# Altium footprint library Footprint.PcbLib: 154 footprints (part 6 of 10)
Each footprint in its own frame and in the unit in brackets; x right, y up, seen from the top. Pads: shape width x height; smd on the part's side, far side on the other; paste and mask are expansions set on the pad; w line width, h text height; cw(c..) or ccw(c..) is an arc to the next point about the centre after c.
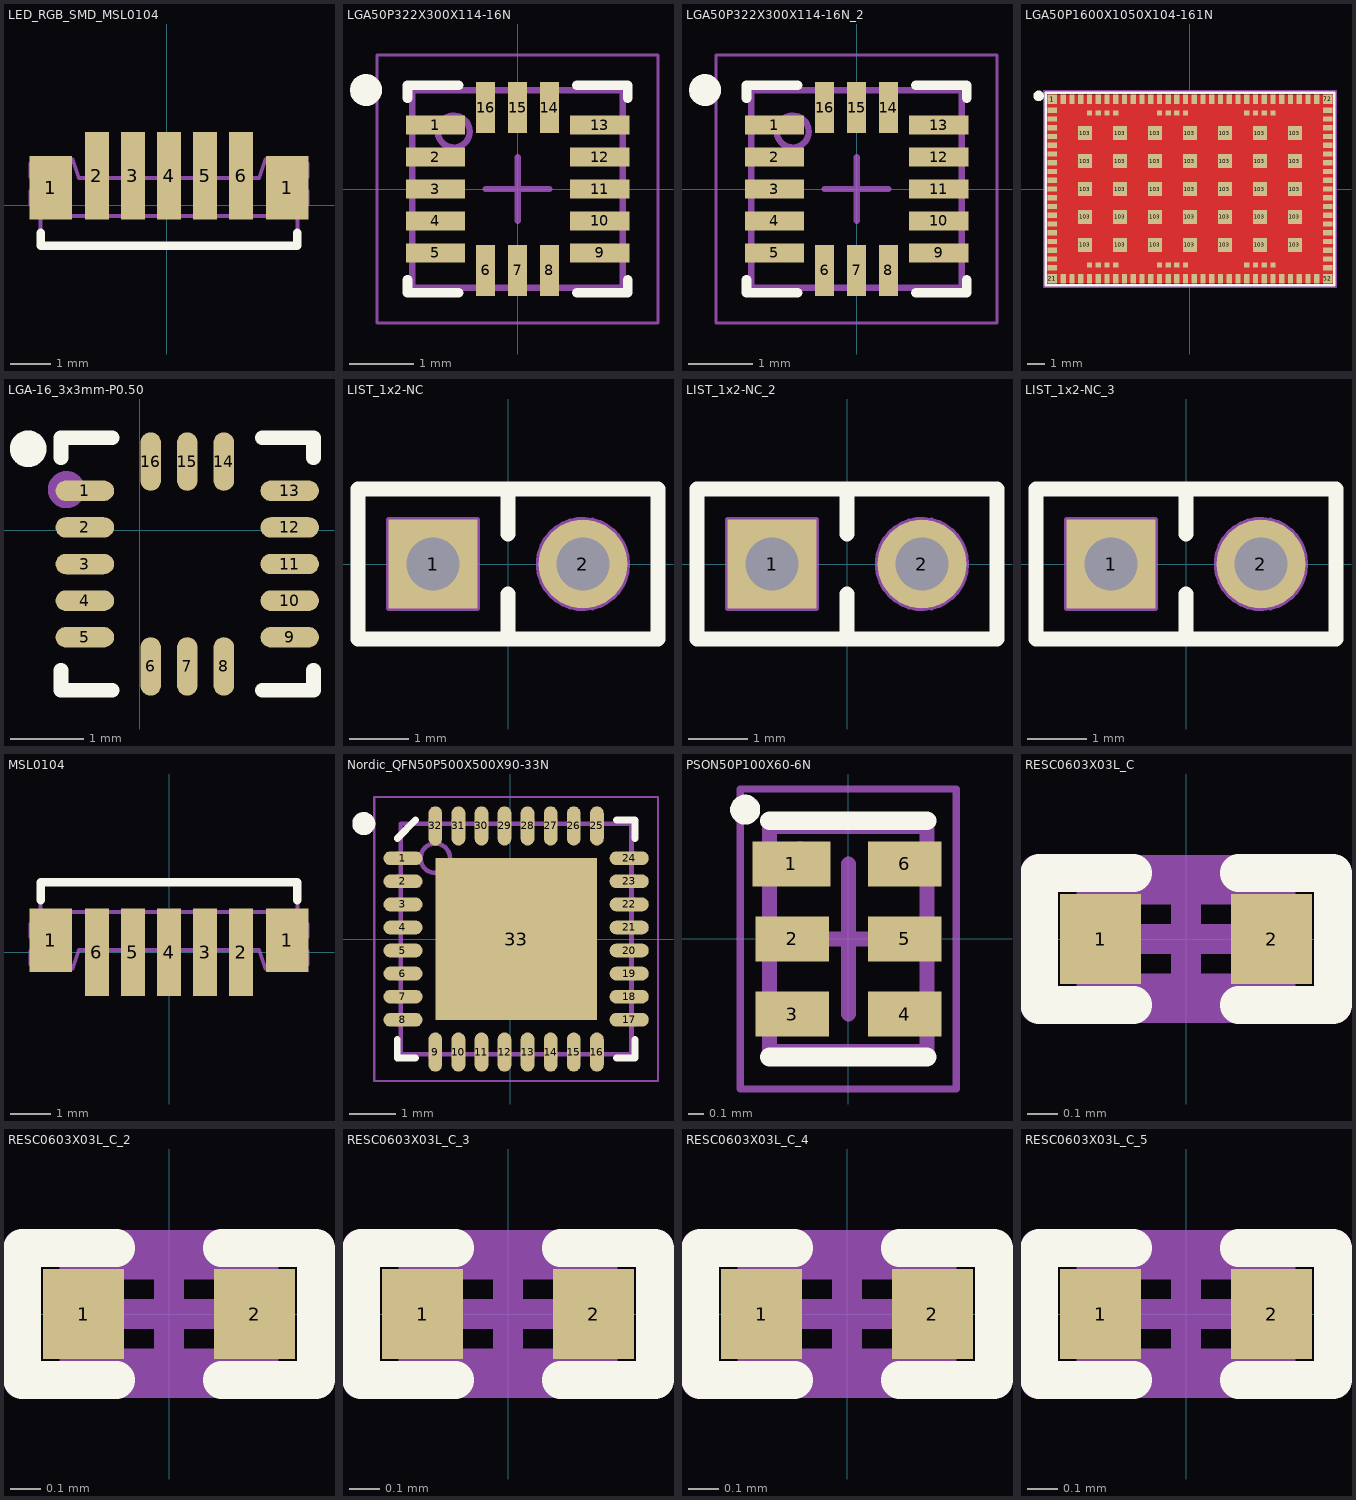
[diagram p5: the footprints below, top view; thin cyan lines are the x and y axes]

## LED_RGB_SMD_MSL0104 [mm]
pads (7):
  rect 1.06x1.58 smd paste+0: 1(-2.899,0.437) 1(3.001,0.437)
  rect 0.6x2.18 smd paste+0: 2(-1.749,0.737) 3(-0.849,0.737) 4(0.051,0.737) 5(0.951,0.737) 6(1.851,0.737)
Top Overlay:
  lines w0.21: -3.149,-0.686 -3.149,-1.013 3.251,-1.013 3.251,-0.686
Mechanical 7:
  lines w0.1: -3.399,0.362 -3.399,0.037 -3.047,0.037 ; -3.399,0.712 -3.399,1.037 -2.958,1.037 ; -3.398,0.362 ccw(c-3.398,0.537) -3.398,0.712 ; -3.074,-0.263 -2.949,1.137 -2.349,1.137 -2.199,0.687 2.301,0.687 2.451,1.137 3.051,1.137 3.176,-0.263 ; -1.999,0.687 -1.999,1.037 -1.499,1.037 -1.499,0.687 ; -1.099,0.687 -1.099,1.037 -0.599,1.037 -0.599,0.687 ; -0.929,-0.263 -0.929,0.687 ; -0.199,0.687 -0.199,1.037 0.301,1.037 0.301,0.687 ; 0.701,0.687 0.701,1.037 1.201,1.037 1.201,0.687 ; 1.031,-0.263 1.031,0.687 ; 1.601,0.687 1.601,1.037 2.101,1.037 2.101,0.687 ; 3.06,1.037 3.501,1.037 3.501,0.712 ; 3.149,0.037 3.501,0.037 3.501,0.362 cw(c3.501,0.537) 3.501,0.712 ; 3.501,0.712 3.502,0.712 ; -3.149,-1.013 -3.149,-0.263 3.251,-0.263 3.251,-1.013 -3.149,-1.013
3D body: height 0.1, standoff 0, extent 1.601,-0.338 2.101,1.037
3D body: height 1.92, standoff 0.33, extent -2.649,-1.038 2.751,-0.988
3D body: height 0.1, standoff 0, extent 0.701,-0.338 1.201,1.037
3D body: height 0.1, standoff 0, extent -0.199,-0.338 0.301,1.037
3D body: height 0.1, standoff 0, extent -1.099,-0.338 -0.599,1.037
3D body: height 0.1, standoff 0, extent -1.999,-0.338 -1.499,1.037
3D body: height 0.1, standoff 0, extent -3.399,-0.338 -2.399,1.037
3D body: height 0.1, standoff 0, extent 2.501,-0.338 3.501,1.037
3D body: height 2.15, standoff 0.1, extent -3.149,-1.013 3.251,-0.263
3D body: height 2.15, standoff 0.1, extent -3.074,-0.263 3.176,1.137

## LGA50P322X300X114-16N [mm]
pads (16):
  rect 0.925x0.3 smd mask+0.06: 1(-1.288,1) 2(-1.288,0.5) 3(-1.288,0) 4(-1.288,-0.5) 5(-1.288,-1) 9(1.288,-1) 10(1.288,-0.5) 11(1.288,0) 12(1.288,0.5) 13(1.288,1)
  rect 0.3x0.8 smd mask+0.06: 6(-0.5,-1.275) 7(0,-1.275) 8(0.5,-1.275) 14(0.5,1.275) 15(0,1.275) 16(-0.5,1.275)
Top Overlay:
  circle w0.25: c-2.375,1.55 r0.125
  lines w0.15: -1.725,-1.425 -1.725,-1.625 -0.925,-1.625 ; -1.725,1.425 -1.725,1.625 -0.925,1.625 ; 0.925,-1.625 1.725,-1.625 1.725,-1.425 ; 0.925,1.625 1.725,1.625 1.725,1.425
Mechanical 7:
  circle w0.1: c-1,0.9 r0.25
  lines w0.1: -1.65,-1.55 1.65,-1.55 1.65,1.55 -1.65,1.55 -1.65,-1.55
Mechanical 15:
  lines w0.05: -2.2,-2.1 2.2,-2.1 2.2,2.1 -2.2,2.1 -2.2,-2.1
  lines w0.1: -0.5,0 0.5,0 ; 0,-0.5 0,0.5
3D body "LGA50P322X300X114-16N.step": height 1.14, standoff 0, extent -1.65,-1.55 1.65,1.55

## LGA50P322X300X114-16N_2 [mm]
pads (16):
  rect 0.925x0.3 smd mask+0.06: 1(-1.288,1) 2(-1.288,0.5) 3(-1.288,0) 4(-1.288,-0.5) 5(-1.288,-1) 9(1.288,-1) 10(1.288,-0.5) 11(1.288,0) 12(1.288,0.5) 13(1.288,1)
  rect 0.3x0.8 smd mask+0.06: 6(-0.5,-1.275) 7(0,-1.275) 8(0.5,-1.275) 14(0.5,1.275) 15(0,1.275) 16(-0.5,1.275)
Top Overlay:
  circle w0.25: c-2.375,1.55 r0.125
  lines w0.15: -1.725,-1.425 -1.725,-1.625 -0.925,-1.625 ; -1.725,1.425 -1.725,1.625 -0.925,1.625 ; 0.925,-1.625 1.725,-1.625 1.725,-1.425 ; 0.925,1.625 1.725,1.625 1.725,1.425
Mechanical 7:
  circle w0.1: c-1,0.9 r0.25
  lines w0.1: -1.65,-1.55 -1.65,1.55 1.65,1.55 1.65,-1.55 -1.65,-1.55
Mechanical 15:
  lines w0.05: -2.2,-2.1 -2.2,2.1 2.2,2.1 2.2,-2.1 -2.2,-2.1
  lines w0.1: -0.5,0 0.5,0 ; 0,-0.5 0,0.5
3D body "LGA50P322X300X114-16N.step": height 1.14, standoff 0, extent -1.65,-1.55 1.65,1.55

## LGA50P1600X1050X104-161N [mm]
pads (161):
  rect 0.54x0.54 smd mask+0.05: 1(-7.87,5.12) 21(-7.87,-5.12) 52(7.87,-5.12) 72(7.87,5.12)
  rect 0.54x0.3 smd mask+0.05: 2(-7.87,4.5) 3(-7.87,4) 4(-7.87,3.5) 5(-7.87,3) 6(-7.87,2.5) 7(-7.87,2) 8(-7.87,1.5) 9(-7.87,1) 10(-7.87,0.5) 11(-7.87,0) 12(-7.87,-0.5) 13(-7.87,-1) 14(-7.87,-1.5) 15(-7.87,-2) 16(-7.87,-2.5) 17(-7.87,-3) 18(-7.87,-3.5) 19(-7.87,-4) 20(-7.87,-4.5) 53(7.87,-4.5) 54(7.87,-4) 55(7.87,-3.5) 56(7.87,-3) 57(7.87,-2.5) 58(7.87,-2) 59(7.87,-1.5) 60(7.87,-1) 61(7.87,-0.5) 62(7.87,0) 63(7.87,0.5) 64(7.87,1) 65(7.87,1.5) 66(7.87,2) 67(7.87,2.5) 68(7.87,3) 69(7.87,3.5) 70(7.87,4) 71(7.87,4.5)
  rect 0.3x0.54 smd mask+0.05: 22(-7.25,-5.12) 23(-6.75,-5.12) 24(-6.25,-5.12) 25(-5.75,-5.12) 26(-5.25,-5.12) 27(-4.75,-5.12) 28(-4.25,-5.12) 29(-3.75,-5.12) 30(-3.25,-5.12) 31(-2.75,-5.12) 32(-2.25,-5.12) 33(-1.75,-5.12) 34(-1.25,-5.12) 35(-0.75,-5.12) 36(-0.25,-5.12) 37(0.25,-5.12) 38(0.75,-5.12) 39(1.25,-5.12) 40(1.75,-5.12) 41(2.25,-5.12) 42(2.75,-5.12) 43(3.25,-5.12) 44(3.75,-5.12) 45(4.25,-5.12) 46(4.75,-5.12) 47(5.25,-5.12) 48(5.75,-5.12) 49(6.25,-5.12) 50(6.75,-5.12) 51(7.25,-5.12) 73(7.25,5.12) 74(6.75,5.12) 75(6.25,5.12) 76(5.75,5.12) 77(5.25,5.12) 78(4.75,5.12) 79(4.25,5.12) 80(3.75,5.12) 81(3.25,5.12) 82(2.75,5.12) 83(2.25,5.12) 84(1.75,5.12) 85(1.25,5.12) 86(0.75,5.12) 87(0.25,5.12) 88(-0.25,5.12) 89(-0.75,5.12) 90(-1.25,5.12) 91(-1.75,5.12) 92(-2.25,5.12) 93(-2.75,5.12) 94(-3.25,5.12) 95(-3.75,5.12) 96(-4.25,5.12) 97(-4.75,5.12) 98(-5.25,5.12) 99(-5.75,5.12) 100(-6.25,5.12) 101(-6.75,5.12) 102(-7.25,5.12)
  rect 0.8x0.8 smd mask+0.05: 103(-6,-3.2) 103(-6,-1.6) 103(-6,0) 103(-6,1.6) 103(-6,3.2) 103(-4,-3.2) 103(-4,-1.6) 103(-4,0) 103(-4,1.6) 103(-4,3.2) 103(-2,-3.2) 103(-2,-1.6) 103(-2,0) 103(-2,1.6) 103(-2,3.2) 103(0,-3.2) 103(0,-1.6) 103(0,0) 103(0,1.6) 103(0,3.2) 103(2,-3.2) 103(2,-1.6) 103(2,0) 103(2,1.6) 103(2,3.2) 103(4,-3.2) 103(4,-1.6) 103(4,0) 103(4,1.6) 103(4,3.2) 103(6,-3.2) 103(6,-1.6) 103(6,0) 103(6,1.6) 103(6,3.2)
  rect 0.3x0.3 smd mask+0.05: 104(-5.75,-4.35) 105(-5.25,-4.35) 106(-4.75,-4.35) 107(-4.25,-4.35) 108(-1.75,-4.35) 109(-1.25,-4.35) 110(-0.75,-4.35) 111(-0.25,-4.35) 112(3.25,-4.35) 113(3.75,-4.35) 114(4.25,-4.35) 115(4.75,-4.35) 116(4.75,4.35) 117(4.25,4.35) 118(3.75,4.35) 119(3.25,4.35) 120(-0.25,4.35) 121(-0.75,4.35) 122(-1.25,4.35) 123(-1.75,4.35) 124(-4.25,4.35) 125(-4.75,4.35) 126(-5.25,4.35) 127(-5.75,4.35)
Top Layer:
  pour cut-out: -8.15,5.4 8.15,5.4 8.15,-5.4 -8.15,-5.4
Top Overlay:
  circle w0.3: c-8.656,5.323 r0.15
  lines w0.15: -8.25,-5.5 -8.25,5.5 8.25,5.5 8.25,-5.5 -8.25,-5.5
Mechanical 7:
  circle w0.3: c-6.5,3.75 r0.15
  lines w0.1: -8.05,-5.3 -8.05,5.3 8.05,5.3 8.05,-5.3 -8.05,-5.3
  text ".Designator" at 0.5,-0.1 h0.38
Mechanical 15:
  circle w0.3: c-6.5,3.75 r0.15
  lines w0.1: -8.35,-5.6 8.35,-5.6 8.35,5.6 -8.35,5.6 -8.35,-5.6
3D body "nRF9160_v5.step": height 1.2, standoff 0, extent -8.05,-5.3 8.05,5.3

## LGA-16_3x3mm-P0.50 [mm]
pads (16):
  oval 0.8x0.28 smd paste+0 mask+0.051: 1(-0.751,0.539) 2(-0.751,0.039) 3(-0.751,-0.461) 4(-0.751,-0.961) 5(-0.751,-1.461) 9(2.049,-1.461) 10(2.049,-0.961) 11(2.049,-0.461) 12(2.049,0.039) 13(2.049,0.539)
  oval 0.28x0.8 smd paste+0 mask+0.051: 6(0.149,-1.861) 7(0.649,-1.861) 8(1.149,-1.861) 14(1.149,0.939) 15(0.649,0.939) 16(0.149,0.939)
Top Overlay:
  lines w0.2: -1.076,-1.911 -1.076,-2.186 -0.376,-2.186 ; -1.076,0.989 -1.076,1.264 -0.376,1.264 ; 1.674,-2.186 2.374,-2.186 2.374,-1.911 ; 1.674,1.264 2.374,1.264 2.374,0.989
  lines w0.25: -1.401,1.111 cw(c-1.526,1.113) -1.401,1.114
Mechanical 15:
  circle w0.254: c-1.002,0.555 r0.127
3D body "User Library-LIS331AL.step": height 1.01, standoff -0.01, extent -0.865,-2.008 2.135,0.992

## LIST_1x2-NC [mm]
pads (2):
  rect 1.5x1.5 hole 0.9: 1(-1.27,0)
  round 1.5 hole 0.9: 2(1.27,0)
Top Overlay:
  lines w0.254: 0,-1.27 0,-0.508 ; 0,0.508 0,1.27 ; -2.54,-1.27 -2.54,1.27 2.54,1.27 2.54,-1.27 -2.54,-1.27
Mechanical 7:
  circle w0.1: c1.27,0 r0.75
  circle w0.1: c-1.27,0 r0.45
  circle w0.1: c1.27,0 r0.45
  lines w0.1: 0,-1.27 0,-0.508 ; 0,0.508 0,1.27 ; -2.54,-1.27 -2.54,1.27 2.54,1.27 2.54,-1.27 -2.54,-1.27 ; -2.02,-0.75 -2.02,0.75 -0.52,0.75 -0.52,-0.75 -2.02,-0.75
  text ".Designator" at -0.4,-0.2 h0.38
Mechanical 8:
  circle w0.1: c1.27,0 r0.75
  circle w0.1: c1.27,0 r0.45
  circle w0.1: c-1.27,0 r0.45
  lines w0.1: -2.02,-0.75 -2.02,0.75 -0.52,0.75 -0.52,-0.75 -2.02,-0.75

## LIST_1x2-NC_2 [mm]
pads (2):
  rect 1.5x1.5 hole 0.9: 1(-1.27,0)
  round 1.5 hole 0.9: 2(1.27,0)
Top Overlay:
  lines w0.254: 0,-1.27 0,-0.508 ; 0,0.508 0,1.27 ; -2.54,-1.27 2.54,-1.27 2.54,1.27 -2.54,1.27 -2.54,-1.27
Mechanical 7:
  circle w0.1: c1.27,0 r0.45
  circle w0.1: c-1.27,0 r0.45
  circle w0.1: c1.27,0 r0.75
  lines w0.1: 0,-1.27 0,-0.508 ; 0,0.508 0,1.27 ; -2.54,-1.27 2.54,-1.27 2.54,1.27 -2.54,1.27 -2.54,-1.27 ; -2.02,-0.75 -0.52,-0.75 -0.52,0.75 -2.02,0.75 -2.02,-0.75
  text ".Designator" at -0.4,-0.2 h0.38
Mechanical 8:
  circle w0.1: c-1.27,0 r0.45
  circle w0.1: c1.27,0 r0.45
  circle w0.1: c1.27,0 r0.75
  lines w0.1: -2.02,-0.75 -0.52,-0.75 -0.52,0.75 -2.02,0.75 -2.02,-0.75

## LIST_1x2-NC_3 [mm]
pads (2):
  rect 1.5x1.5 hole 0.9: 1(-1.27,0)
  round 1.5 hole 0.9: 2(1.27,0)
Top Overlay:
  lines w0.254: 0,-1.27 0,-0.508 ; 0,0.508 0,1.27 ; -2.54,-1.27 2.54,-1.27 2.54,1.27 -2.54,1.27 -2.54,-1.27
Mechanical 7:
  circle w0.1: c1.27,0 r0.45
  circle w0.1: c-1.27,0 r0.45
  circle w0.1: c1.27,0 r0.75
  lines w0.1: 0,-1.27 0,-0.508 ; 0,0.508 0,1.27 ; -2.54,-1.27 2.54,-1.27 2.54,1.27 -2.54,1.27 -2.54,-1.27 ; -2.02,-0.75 -0.52,-0.75 -0.52,0.75 -2.02,0.75 -2.02,-0.75
  text ".Designator" at -0.4,-0.2 h0.38
Mechanical 8:
  circle w0.1: c-1.27,0 r0.45
  circle w0.1: c1.27,0 r0.45
  circle w0.1: c1.27,0 r0.75
  lines w0.1: -2.02,-0.75 -0.52,-0.75 -0.52,0.75 -2.02,0.75 -2.02,-0.75

## MSL0104 [mm]
pads (7):
  rect 1.06x1.58 smd paste+0: 1(-2.95,0.3) 1(2.95,0.3)
  rect 0.6x2.18 smd paste+0: 2(1.8,0) 3(0.9,0) 4(0,0) 5(-0.9,0) 6(-1.8,0)
Top Overlay:
  lines w0.21: -3.2,1.3 -3.2,1.75 3.2,1.75 3.2,1.3
Mechanical 7:
  lines w0.1: -3.125,1 -3,-0.4 -2.4,-0.4 -2.25,0.05 2.25,0.05 2.4,-0.4 3,-0.4 3.125,1 ; -3.098,0.7 -3.45,0.7 -3.45,0.375 cw(c-3.45,0.2) -3.45,0.025 ; -3.009,-0.3 -3.45,-0.3 -3.45,0.025 ; -2.05,0.05 -2.05,-0.3 -1.55,-0.3 -1.55,0.05 ; -1.15,0.05 -1.15,-0.3 -0.65,-0.3 -0.65,0.05 ; -0.98,0.05 -0.98,1 ; -0.25,0.05 -0.25,-0.3 0.25,-0.3 0.25,0.05 ; 0.65,0.05 0.65,-0.3 1.15,-0.3 1.15,0.05 ; 0.98,0.05 0.98,1 ; 1.55,0.05 1.55,-0.3 2.05,-0.3 2.05,0.05 ; 3.009,-0.3 3.45,-0.3 3.45,0.025 ; 3.098,0.7 3.45,0.7 3.45,0.375 ; 3.449,0.025 cw(c3.449,0.2) 3.449,0.375 ; -3.451,0.025 -3.45,0.025 ; -3.2,1 3.2,1 3.2,1.75 -3.2,1.75 -3.2,1
  text ".Designator" at -0.9,1.2 h0.38
3D body: height 0.1, standoff 0, extent -2.05,-0.3 -1.55,1.075
3D body: height 1.92, standoff 0.33, extent -2.7,1.725 2.7,1.775
3D body: height 2.15, standoff 0.1, extent -3.125,-0.4 3.125,1
3D body: height 2.15, standoff 0.1, extent -3.2,1 3.2,1.75
3D body: height 0.1, standoff 0, extent -1.15,-0.3 -0.65,1.075
3D body: height 0.1, standoff 0, extent -0.25,-0.3 0.25,1.075
3D body: height 0.1, standoff 0, extent 0.65,-0.3 1.15,1.075
3D body: height 0.1, standoff 0, extent 1.55,-0.3 2.05,1.075
3D body: height 0.1, standoff 0, extent 2.45,-0.3 3.45,1.075
3D body: height 0.1, standoff 0, extent -3.45,-0.3 -2.45,1.075

## Nordic_QFN50P500X500X90-33N [mm]
pads (33):
  oval 0.85x0.3 smd mask+0.076: 1(-2.323,1.75) 2(-2.323,1.25) 3(-2.323,0.75) 4(-2.323,0.25) 5(-2.323,-0.25) 6(-2.323,-0.75) 7(-2.323,-1.25) 8(-2.323,-1.75) 17(2.577,-1.75) 18(2.577,-1.25) 19(2.577,-0.75) 20(2.577,-0.25) 21(2.577,0.25) 22(2.577,0.75) 23(2.577,1.25) 24(2.577,1.75)
  oval 0.3x0.85 smd mask+0.076: 9(-1.623,-2.45) 10(-1.123,-2.45) 11(-0.623,-2.45) 12(-0.123,-2.45) 13(0.377,-2.45) 14(0.877,-2.45) 15(1.377,-2.45) 16(1.877,-2.45) 25(1.877,2.45) 26(1.377,2.45) 27(0.877,2.45) 28(0.377,2.45) 29(-0.123,2.45) 30(-0.623,2.45) 31(-1.123,2.45) 32(-1.623,2.45)
  rect 3.5x3.5 smd: 33(0.127,0)
Top Overlay:
  circle w0.25: c-3.173,2.5 r0.125
  lines w0.15: -2.448,-2.175 -2.448,-2.575 -2.048,-2.575 ; -2.448,2.175 -2.048,2.575 ; 2.302,-2.575 2.702,-2.575 2.702,-2.175 ; 2.302,2.575 2.702,2.575 2.702,2.175
Top Courtyard:
  lines w0.05: -2.948,-3.075 -2.948,3.075 3.202,3.075 3.202,-3.075 -2.948,-3.075
  lines w0.1: -0.373,0 0.627,0 ; 0.127,-0.5 0.127,0.5
Mechanical 7:
  circle w0.1: c-1.623,1.75 r0.32
  lines w0.1: -2.373,-1.845 -2.444,-1.845 cw(c-2.444,-1.75) -2.444,-1.655 -2.373,-1.655 ; -2.373,-1.345 -2.444,-1.345 cw(c-2.444,-1.25) -2.444,-1.155 -2.373,-1.155 ; -2.373,-0.845 -2.444,-0.845 cw(c-2.444,-0.75) -2.444,-0.655 -2.373,-0.655 ; -2.373,-0.345 -2.444,-0.345 cw(c-2.444,-0.25) -2.444,-0.155 -2.373,-0.155 ; -2.373,0.155 -2.444,0.155 cw(c-2.444,0.25) -2.444,0.345 -2.373,0.345 ; -2.373,0.655 -2.444,0.655 cw(c-2.444,0.75) -2.444,0.845 -2.373,0.845 ; -2.373,1.155 -2.444,1.155 cw(c-2.444,1.25) -2.444,1.345 -2.373,1.345 ; -2.373,1.655 -2.444,1.655 cw(c-2.444,1.75) -2.444,1.845 -2.373,1.845 ; -1.718,-2.5 -1.718,-2.571 ccw(c-1.623,-2.571) -1.528,-2.571 -1.528,-2.5 ; -1.718,2.5 -1.718,2.571 cw(c-1.623,2.571) -1.528,2.571 -1.528,2.5 ; -1.218,-2.5 -1.218,-2.571 ccw(c-1.123,-2.571) -1.028,-2.571 -1.028,-2.5 ; -1.218,2.5 -1.218,2.571 cw(c-1.123,2.571) -1.028,2.571 -1.028,2.5 ; -0.718,-2.5 -0.718,-2.571 ccw(c-0.623,-2.571) -0.528,-2.571 -0.528,-2.5 ; -0.718,2.5 -0.718,2.571 cw(c-0.623,2.571) -0.528,2.571 -0.528,2.5 ; -0.218,-2.5 -0.218,-2.571 ccw(c-0.123,-2.571) -0.028,-2.571 -0.028,-2.5 ; -0.218,2.5 -0.218,2.571 cw(c-0.123,2.571) -0.028,2.571 -0.028,2.5 ; 0.282,-2.5 0.282,-2.571 ccw(c0.377,-2.571) 0.472,-2.571 0.472,-2.5 ; 0.282,2.5 0.282,2.571 cw(c0.377,2.571) 0.472,2.571 0.472,2.5 ; 0.782,-2.5 0.782,-2.571 ccw(c0.877,-2.571) 0.972,-2.571 0.972,-2.5 ; 0.782,2.5 0.782,2.571 cw(c0.877,2.571) 0.972,2.571 0.972,2.5 ; 1.282,-2.5 1.282,-2.571 ccw(c1.377,-2.571) 1.472,-2.571 1.472,-2.5 ; 1.282,2.5 1.282,2.571 cw(c1.377,2.571) 1.472,2.571 1.472,2.5 ; 1.782,-2.5 1.782,-2.571 ccw(c1.877,-2.571) 1.972,-2.571 1.972,-2.5 ; 1.782,2.5 1.782,2.571 cw(c1.877,2.571) 1.972,2.571 1.972,2.5 ; 2.627,-1.845 2.698,-1.845 ccw(c2.698,-1.75) 2.698,-1.655 2.627,-1.655 ; 2.627,-1.345 2.698,-1.345 ccw(c2.698,-1.25) 2.698,-1.155 2.627,-1.155 ; 2.627,-0.845 2.698,-0.845 ccw(c2.698,-0.75) 2.698,-0.655 2.627,-0.655 ; 2.627,-0.345 2.698,-0.345 ccw(c2.698,-0.25) 2.698,-0.155 2.627,-0.155 ; 2.627,0.155 2.698,0.155 ccw(c2.698,0.25) 2.698,0.345 2.627,0.345 ; 2.627,0.655 2.698,0.655 ccw(c2.698,0.75) 2.698,0.845 2.627,0.845 ; 2.627,1.155 2.698,1.155 ccw(c2.698,1.25) 2.698,1.345 2.627,1.345 ; 2.627,1.655 2.698,1.655 ccw(c2.698,1.75) 2.698,1.845 2.627,1.845 ; -2.373,-2.5 2.627,-2.5 2.627,2.5 -2.373,2.5 -2.373,-2.5
  text ".Designator" at -1.398,-0.102 h0.31
3D body "QFN50P500X500X90_HS-33N.step": height 0.9, standoff 0, extent -2.374,-2.501 2.628,2.501

## PSON50P100X60-6N [mm]
pads (6):
  rect 0.52x0.3 smd mask+0.05: 1(-0.38,0.5)
  rect 0.49x0.3 smd mask+0.05: 2(-0.375,0) 3(-0.375,-0.5) 4(0.375,-0.5) 5(0.375,0) 6(0.375,0.5)
Top Overlay:
  circle w0.1: c-0.687,0.862 r0.05
  lines w0.125: -0.525,-0.787 0.525,-0.787 ; -0.525,0.787 0.525,0.787
Mechanical 7:
  circle w0.1: c-0.325,0.55 r0.05
  lines w0.1: -0.525,-0.75 -0.525,0.75 0.525,0.75 0.525,-0.75 -0.525,-0.75
  text ".Designator" at 0.152,-0.379 h0.3
Mechanical 15:
  lines w0.05: -0.72,-1 -0.72,1 0.72,1 0.72,-1 -0.72,-1
  lines w0.1: -0.5,0 0.5,0 ; 0,-0.5 0,0.5
3D body "PSON50P100X60-6N.step": height 0.6, standoff 0, extent -0.526,-0.75 0.526,0.75

## RESC0603X03L_C [mm]
pads (2):
  rect 0.27x0.3 smd: 1(-0.285,0) 2(0.285,0)
Top Overlay:
  lines w0.125: -0.175,-0.22 -0.49,-0.22 -0.49,0.22 -0.175,0.22 ; 0.175,-0.22 0.49,-0.22 0.49,0.22 0.175,0.22
Mechanical 7:
  lines w0.1: -0.315,-0.165 -0.315,0.165 0.315,0.165 0.315,-0.165 -0.315,-0.165
  text ".Designator" at -0.306,0.268 h0.3
Mechanical 15:
  lines w0.1: -0.165,0 0.165,0 ; 0,-0.165 0,0.165 ; -0.5,-0.23 -0.5,0.23 0.5,0.23 0.5,-0.23 -0.5,-0.23
3D body "User Library-res0201-1.step": height 0.23, standoff 0, extent -0.3,-0.15 0.3,0.15

## RESC0603X03L_C_2 [mm]
pads (2):
  rect 0.27x0.3 smd: 1(-0.285,0) 2(0.285,0)
Top Overlay:
  lines w0.125: -0.175,-0.22 -0.49,-0.22 -0.49,0.22 -0.175,0.22 ; 0.175,-0.22 0.49,-0.22 0.49,0.22 0.175,0.22
Mechanical 7:
  lines w0.1: -0.315,-0.165 0.315,-0.165 0.315,0.165 -0.315,0.165 -0.315,-0.165
  text ".Designator" at -0.306,0.268 h0.3
Mechanical 15:
  lines w0.1: -0.165,0 0.165,0 ; 0,-0.165 0,0.165 ; -0.5,-0.23 0.5,-0.23 0.5,0.23 -0.5,0.23 -0.5,-0.23
3D body "User Library-res0201-1.step": height 0.23, standoff 0, extent -0.3,-0.15 0.3,0.15

## RESC0603X03L_C_3 [mm]
pads (2):
  rect 0.27x0.3 smd: 1(-0.285,0) 2(0.285,0)
Top Overlay:
  lines w0.125: -0.175,-0.22 -0.49,-0.22 -0.49,0.22 -0.175,0.22 ; 0.175,-0.22 0.49,-0.22 0.49,0.22 0.175,0.22
Mechanical 7:
  lines w0.1: -0.315,-0.165 0.315,-0.165 0.315,0.165 -0.315,0.165 -0.315,-0.165
  text ".Designator" at -0.306,0.268 h0.3
Mechanical 15:
  lines w0.1: -0.165,0 0.165,0 ; 0,-0.165 0,0.165 ; -0.5,-0.23 0.5,-0.23 0.5,0.23 -0.5,0.23 -0.5,-0.23
3D body "User Library-res0201-1.step": height 0.23, standoff 0, extent -0.3,-0.15 0.3,0.15

## RESC0603X03L_C_4 [mm]
pads (2):
  rect 0.27x0.3 smd: 1(-0.285,0) 2(0.285,0)
Top Overlay:
  lines w0.125: -0.175,-0.22 -0.49,-0.22 -0.49,0.22 -0.175,0.22 ; 0.175,-0.22 0.49,-0.22 0.49,0.22 0.175,0.22
Mechanical 7:
  lines w0.1: -0.315,-0.165 -0.315,0.165 0.315,0.165 0.315,-0.165 -0.315,-0.165
  text ".Designator" at -0.306,0.268 h0.3
Mechanical 15:
  lines w0.1: -0.165,0 0.165,0 ; 0,-0.165 0,0.165 ; -0.5,-0.23 -0.5,0.23 0.5,0.23 0.5,-0.23 -0.5,-0.23
3D body "User Library-res0201-1.step": height 0.23, standoff 0, extent -0.3,-0.15 0.3,0.15

## RESC0603X03L_C_5 [mm]
pads (2):
  rect 0.27x0.3 smd: 1(-0.285,0) 2(0.285,0)
Top Overlay:
  lines w0.125: -0.175,-0.22 -0.49,-0.22 -0.49,0.22 -0.175,0.22 ; 0.175,-0.22 0.49,-0.22 0.49,0.22 0.175,0.22
Mechanical 7:
  lines w0.1: -0.315,-0.165 -0.315,0.165 0.315,0.165 0.315,-0.165 -0.315,-0.165
  text ".Designator" at -0.306,0.268 h0.3
Mechanical 15:
  lines w0.1: -0.165,0 0.165,0 ; 0,-0.165 0,0.165 ; -0.5,-0.23 -0.5,0.23 0.5,0.23 0.5,-0.23 -0.5,-0.23
3D body "User Library-res0201-1.step": height 0.23, standoff 0, extent -0.3,-0.15 0.3,0.15